# Altium footprint library header.PcbLib: 139 footprints (part 8 of 9)
Each footprint in its own frame and in the unit in brackets; x right, y up, seen from the top. Pads: shape width x height; smd on the part's side, far side on the other; paste and mask are expansions set on the pad; w line width, h text height; cw(c..) or ccw(c..) is an arc to the next point about the centre after c.
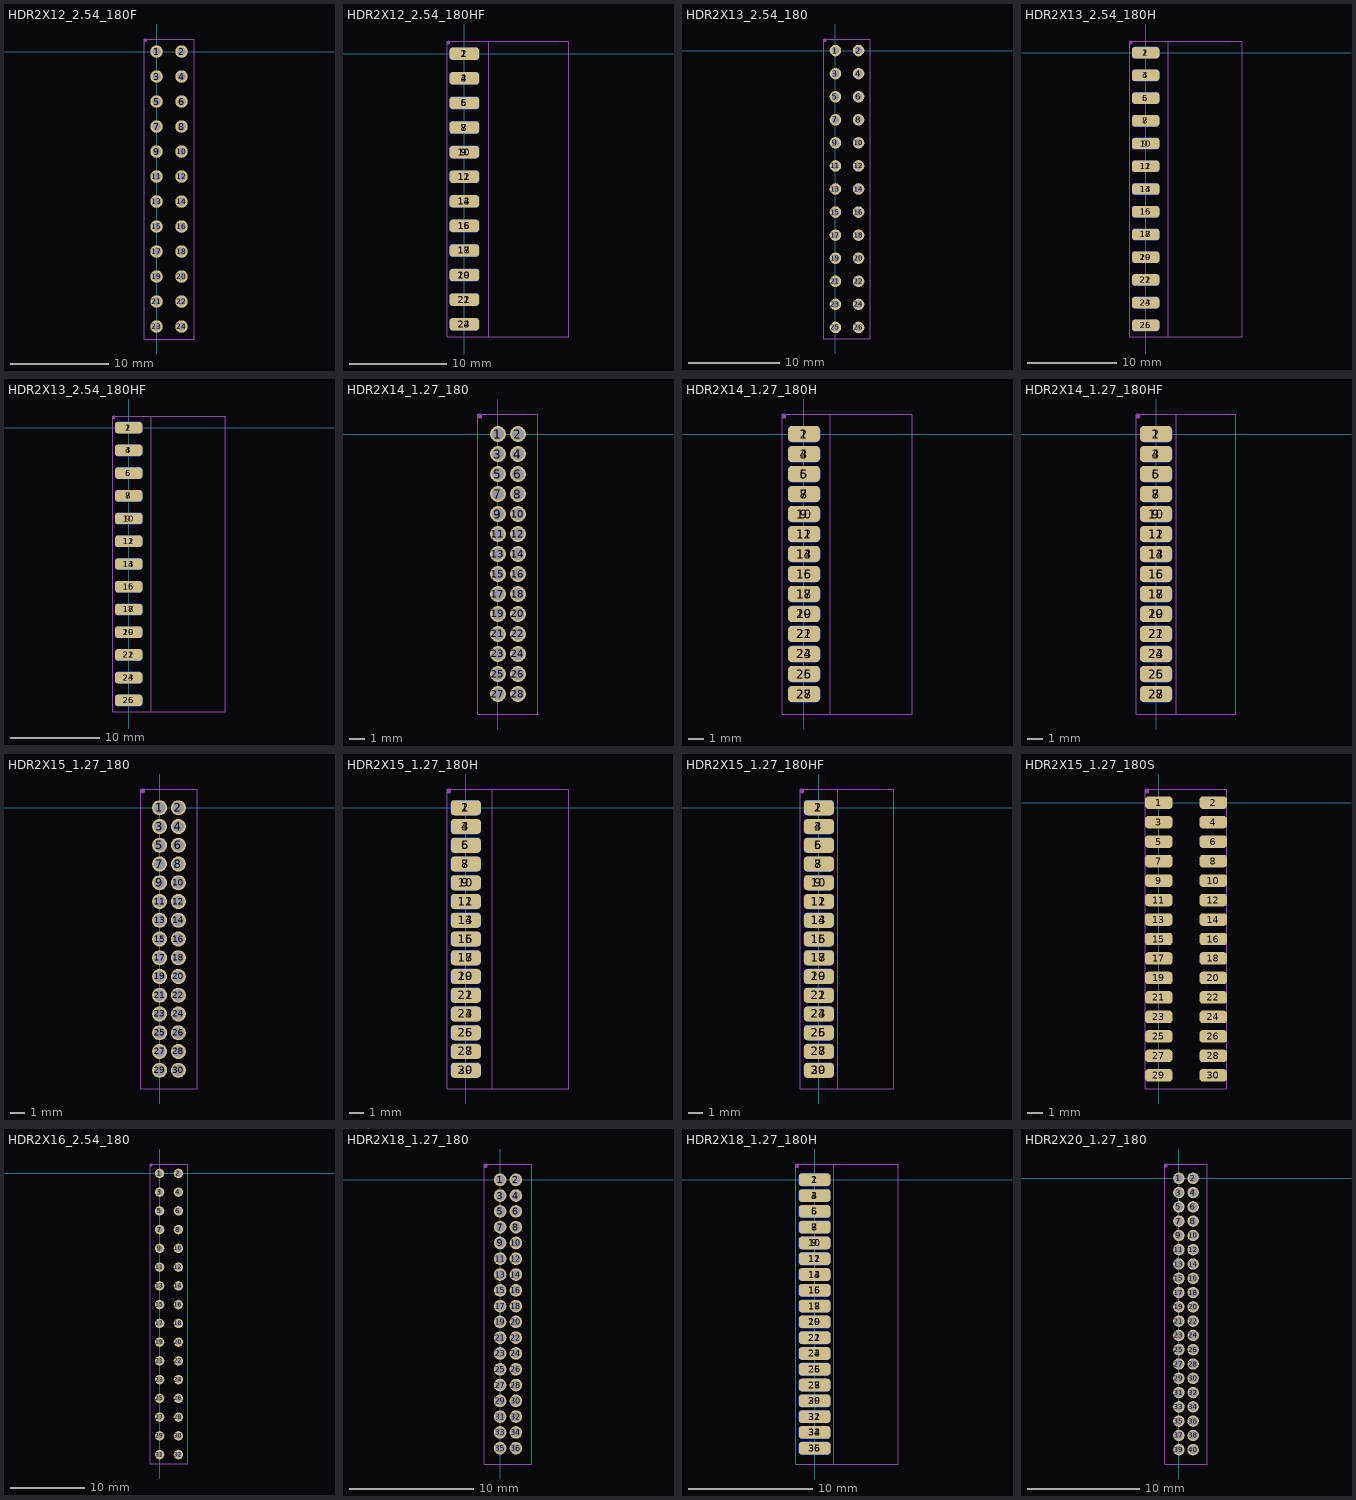
[diagram p7: the footprints below, top view; thin cyan lines are the x and y axes]

## HDR2X12_2.54_180F [mil]
height 169.29
pads (24):
  round 50 hole 32: 1(0,0) 2(100,0) 3(0,-100) 4(100,-100) 5(0,-200) 6(100,-200) 7(0,-300) 8(100,-300) 9(0,-400) 10(100,-400) 11(0,-500) 12(100,-500) 13(0,-600) 14(100,-600) 15(0,-700) 16(100,-700) 17(0,-800) 18(100,-800) 19(0,-900) 20(100,-900) 21(0,-1000) 22(100,-1000) 23(0,-1100) 24(100,-1100)
Mechanical 13:
  lines w2: -50,-1150 -50,50 150,50 150,-1150 -50,-1150
Top Component (Mech14):
  circle w2: c-45,45 r5
  region: -45,40 -45.99,40 -47.83,40.76 -49.24,42.17 -50,44.01 -50,45 -50,45.99 -49.24,47.83 -47.83,49.24 -45.99,50 -45,50 -44.01,50 -42.17,49.24 -40.76,47.83 -40,45.99 -40,45 -40,44.01 -40.76,42.17 -42.17,40.76 -44.01,40
  lines w2: -50,-1150 150,-1150 150,50 -50,50 -50,-1150
  text ".Designator" at 19,-570 h80
3D body "female_header_a-bl254-dg-g24d.stp": height 334.65, standoff -125.98, extent -48.43,-1154.92 148.42,54.92

## HDR2X12_2.54_180HF [mil]
height 169.29
pads (24):
  rrect50% 120x50 smd: 1(0,0) 3(0,-100) 5(0,-200) 7(0,-300) 9(0,-400) 11(0,-500) 13(0,-600) 15(0,-700) 17(0,-800) 19(0,-900) 21(0,-1000) 23(0,-1100)
  rrect50% 120x50 smd far side: 2(0,0) 4(0,-100) 6(0,-200) 8(0,-300) 10(0,-400) 12(0,-500) 14(0,-600) 16(0,-700) 18(0,-800) 20(0,-900) 22(0,-1000) 24(0,-1100)
Mechanical 13:
  lines w2: -70,-1150 425,-1150 425,50 -70,50 -70,-1150
Top Component (Mech14):
  circle w2: c-65,45 r5
  region: -65,40 -65.99,40 -67.83,40.76 -69.24,42.17 -70,44.01 -70,45 -70,45.99 -69.24,47.83 -67.83,49.24 -65.99,50 -65,50 -64.01,50 -62.17,49.24 -60.76,47.83 -60,45.99 -60,45 -60,44.01 -60.76,42.17 -62.17,40.76 -64.01,40
  lines w2: -70,-1150 100,-1150 100,50 -70,50 -70,-1150
  text ".Designator" at -31,-570 h80
Bottom Component (Mech15):
  lines w2: -70,-1150 -70,50 100,50 100,-1150 -70,-1150
3D body "female_header_a-bl254-dg-g24d.stp": height 76.43, standoff -120.43, extent -35.97,-1154.92 424.66,54.92

## HDR2X13_2.54_180 [mil]
height 169.29
pads (26):
  round 50 hole 32: 1(0,0) 2(100,0) 3(0,-100) 4(100,-100) 5(0,-200) 6(100,-200) 7(0,-300) 8(100,-300) 9(0,-400) 10(100,-400) 11(0,-500) 12(100,-500) 13(0,-600) 14(100,-600) 15(0,-700) 16(100,-700) 17(0,-800) 18(100,-800) 19(0,-900) 20(100,-900) 21(0,-1000) 22(100,-1000) 23(0,-1100) 24(100,-1100) 25(0,-1200) 26(100,-1200)
Mechanical 13:
  lines w2: -50,-1250 -50,50 150,50 150,-1250 -50,-1250
Top Component (Mech14):
  circle w2: c-45,45 r5
  region: -45,40 -45.99,40 -47.83,40.76 -49.24,42.17 -50,44.01 -50,45 -50,45.99 -49.24,47.83 -47.83,49.24 -45.99,50 -45,50 -44.01,50 -42.17,49.24 -40.76,47.83 -40,45.99 -40,45 -40,44.01 -40.76,42.17 -42.17,40.76 -44.01,40
  lines w2: -50,-1250 150,-1250 150,50 -50,50 -50,-1250
  text ".Designator" at 19,-570 h80
3D body "pin_header_aw140-eg-g02d.stp": height 322.83, standoff -118.11, extent -50,-1249.18 150,-1150.82
3D body "pin_header_awl254-dg-g24d.stp": height 334.65, standoff -118.11, extent -50,-1149.99 150,50.01

## HDR2X13_2.54_180H [mil]
height 169.29
pads (26):
  rrect50% 120x50 smd: 1(0,0) 3(0,-100) 5(0,-200) 7(0,-300) 9(0,-400) 11(0,-500) 13(0,-600) 15(0,-700) 17(0,-800) 19(0,-900) 21(0,-1000) 23(0,-1100) 25(0,-1200)
  rrect50% 120x50 smd far side: 2(0,0) 4(0,-100) 6(0,-200) 8(0,-300) 10(0,-400) 12(0,-500) 14(0,-600) 16(0,-700) 18(0,-800) 20(0,-900) 22(0,-1000) 24(0,-1100) 26(0,-1200)
Mechanical 13:
  lines w2: -70,-1250 425,-1250 425,50 -70,50 -70,-1250
Top Component (Mech14):
  circle w2: c-65,45 r5
  region: -65,40 -65.99,40 -67.83,40.76 -69.24,42.17 -70,44.01 -70,45 -70,45.99 -69.24,47.83 -67.83,49.24 -65.99,50 -65,50 -64.01,50 -62.17,49.24 -60.76,47.83 -60,45.99 -60,45 -60,44.01 -60.76,42.17 -62.17,40.76 -64.01,40
  lines w2: -70,-1250 100,-1250 100,50 -70,50 -70,-1250
  text ".Designator" at -31,-620 h80
Bottom Component (Mech15):
  lines w2: -70,-1250 100,-1250 100,50 -70,50 -70,-1250
3D body "pin_header_awl254-dg-g26d.stp": height 100, standoff -100, extent -36.38,-1250 416.38,50

## HDR2X13_2.54_180HF [mil]
height 169.29
pads (26):
  rrect50% 120x50 smd: 1(0,0) 3(0,-100) 5(0,-200) 7(0,-300) 9(0,-400) 11(0,-500) 13(0,-600) 15(0,-700) 17(0,-800) 19(0,-900) 21(0,-1000) 23(0,-1100) 25(0,-1200)
  rrect50% 120x50 smd far side: 2(0,0) 4(0,-100) 6(0,-200) 8(0,-300) 10(0,-400) 12(0,-500) 14(0,-600) 16(0,-700) 18(0,-800) 20(0,-900) 22(0,-1000) 24(0,-1100) 26(0,-1200)
Mechanical 13:
  lines w2: -70,-1250 425,-1250 425,50 -70,50 -70,-1250
Top Component (Mech14):
  circle w2: c-65,45 r5
  region: -65,40 -65.99,40 -67.83,40.76 -69.24,42.17 -70,44.01 -70,45 -70,45.99 -69.24,47.83 -67.83,49.24 -65.99,50 -65,50 -64.01,50 -62.17,49.24 -60.76,47.83 -60,45.99 -60,45 -60,44.01 -60.76,42.17 -62.17,40.76 -64.01,40
  lines w2: -70,-1250 100,-1250 100,50 -70,50 -70,-1250
  text ".Designator" at -31,-620 h80
Bottom Component (Mech15):
  lines w2: -70,-1250 100,-1250 100,50 -70,50 -70,-1250
3D body "female_header_a-bl254-dg-g26d.stp": height 76.43, standoff -120.43, extent -35.98,-1254.92 424.65,54.92

## HDR2X14_1.27_180 [mil]
height 169.29
pads (28):
  round 40 hole 30: 1(0,0) 2(50,0) 3(0,-50) 4(50,-50) 5(0,-100) 6(50,-100) 7(0,-150) 8(50,-150) 9(0,-200) 10(50,-200) 11(0,-250) 12(50,-250) 13(0,-300) 14(50,-300) 15(0,-350) 16(50,-350) 17(0,-400) 18(50,-400) 19(0,-450) 20(50,-450) 21(0,-500) 22(50,-500) 23(0,-550) 24(50,-550) 25(0,-600) 26(50,-600) 27(0,-650) 28(50,-650)
Mechanical 13:
  lines w2: -50,-700 100,-700 100,50 -50,50 -50,-700
Top Component (Mech14):
  circle w2: c-45,45 r5
  region: -45,40 -45.99,40 -47.83,40.76 -49.24,42.17 -50,44.01 -50,45 -50,45.99 -49.24,47.83 -47.83,49.24 -45.99,50 -45,50 -44.01,50 -42.17,49.24 -40.76,47.83 -40,45.99 -40,45 -40,44.01 -40.76,42.17 -42.17,40.76 -44.01,40
  lines w2: -50,-700 100,-700 100,50 -50,50 -50,-700
  text ".Designator" at -6,-345 h80
3D body "pin_header_a-sl127-dg-g28d.stp": height 210.24, standoff -102.36, extent -73.42,-674.99 123.43,25.01

## HDR2X14_1.27_180H [mil]
height 169.29
pads (28):
  rrect50% 80x40 smd: 1(0,0) 3(0,-50) 5(0,-100) 7(0,-150) 9(0,-200) 11(0,-250) 13(0,-300) 15(0,-350) 17(0,-400) 19(0,-450) 21(0,-500) 23(0,-550) 25(0,-600) 27(0,-650)
  rrect50% 80x40 smd far side: 2(0,0) 4(0,-50) 6(0,-100) 8(0,-150) 10(0,-200) 12(0,-250) 14(0,-300) 16(0,-350) 18(0,-400) 20(0,-450) 22(0,-500) 24(0,-550) 26(0,-600) 28(0,-650)
Mechanical 13:
  lines w2: -55,-700 270,-700 270,50 -55,50 -55,-700
Top Component (Mech14):
  circle w2: c-50,45 r5
  region: -50,40 -50.99,40 -52.83,40.76 -54.24,42.17 -55,44.01 -55,45 -55,45.99 -54.24,47.83 -52.83,49.24 -50.99,50 -50,50 -49.01,50 -47.17,49.24 -45.76,47.83 -45,45.99 -45,45 -45,44.01 -45.76,42.17 -47.17,40.76 -49.01,40
  lines w2: -55,-700 65,-700 65,50 -55,50 -55,-700
  text ".Designator" at -31,-345 h80
3D body "pin_header_a-sl127-dg-g28d.stp": height 76.43, standoff -120.43, extent -41.22,-675 271.38,25

## HDR2X14_1.27_180HF [mil]
height 169.29
pads (28):
  rrect50% 80x40 smd: 1(0,0) 3(0,-50) 5(0,-100) 7(0,-150) 9(0,-200) 11(0,-250) 13(0,-300) 15(0,-350) 17(0,-400) 19(0,-450) 21(0,-500) 23(0,-550) 25(0,-600) 27(0,-650)
  rrect50% 80x40 smd far side: 2(0,0) 4(0,-50) 6(0,-100) 8(0,-150) 10(0,-200) 12(0,-250) 14(0,-300) 16(0,-350) 18(0,-400) 20(0,-450) 22(0,-500) 24(0,-550) 26(0,-600) 28(0,-650)
Mechanical 13:
  lines w2: -50,-700 -50,50 200,50 200,-700 -50,-700
Top Component (Mech14):
  circle w2: c-45,45 r5
  region: -45,40 -45.99,40 -47.83,40.76 -49.24,42.17 -50,44.01 -50,45 -50,45.99 -49.24,47.83 -47.83,49.24 -45.99,50 -45,50 -44.01,50 -42.17,49.24 -40.76,47.83 -40,45.99 -40,45 -40,44.01 -40.76,42.17 -42.17,40.76 -44.01,40
  lines w2: -50,-700 -50,50 50,50 50,-700 -50,-700
  text ".Designator" at -31,-345 h80
3D body "female_header_a-bl127-dg-g28d.stp": height 40.02, standoff -82.02, extent -28.34,-682.88 200.01,32.87

## HDR2X15_1.27_180 [mil]
height 169.29
pads (30):
  round 40 hole 30: 1(0,0) 2(50,0) 3(0,-50) 4(50,-50) 5(0,-100) 6(50,-100) 7(0,-150) 8(50,-150) 9(0,-200) 10(50,-200) 11(0,-250) 12(50,-250) 13(0,-300) 14(50,-300) 15(0,-350) 16(50,-350) 17(0,-400) 18(50,-400) 19(0,-450) 20(50,-450) 21(0,-500) 22(50,-500) 23(0,-550) 24(50,-550) 25(0,-600) 26(50,-600) 27(0,-650) 28(50,-650) 29(0,-700) 30(50,-700)
Mechanical 13:
  lines w2: -50,-750 -50,50 100,50 100,-750 -50,-750
Top Component (Mech14):
  circle w2: c-45,45 r5
  region: -45,40 -45.99,40 -47.83,40.76 -49.24,42.17 -50,44.01 -50,45 -50,45.99 -49.24,47.83 -47.83,49.24 -45.99,50 -45,50 -44.01,50 -42.17,49.24 -40.76,47.83 -40,45.99 -40,45 -40,44.01 -40.76,42.17 -42.17,40.76 -44.01,40
  lines w2: -50,-750 -50,50 100,50 100,-750 -50,-750
  text ".Designator" at -6,-395 h80
3D body "pin_header_a-sl127-dg-g30d.stp": height 210.24, standoff -102.36, extent -73.43,-724.99 123.42,25

## HDR2X15_1.27_180H [mil]
height 169.29
pads (30):
  rrect50% 80x40 smd: 1(0,0) 3(0,-50) 5(0,-100) 7(0,-150) 9(0,-200) 11(0,-250) 13(0,-300) 15(0,-350) 17(0,-400) 19(0,-450) 21(0,-500) 23(0,-550) 25(0,-600) 27(0,-650) 29(0,-700)
  rrect50% 80x40 smd far side: 2(0,0) 4(0,-50) 6(0,-100) 8(0,-150) 10(0,-200) 12(0,-250) 14(0,-300) 16(0,-350) 18(0,-400) 20(0,-450) 22(0,-500) 24(0,-550) 26(0,-600) 28(0,-650) 30(0,-700)
Mechanical 13:
  lines w2: -50,-750 -50,50 275,50 275,-750 -50,-750
Top Component (Mech14):
  circle w2: c-45,45 r5
  region: -45,40 -45.99,40 -47.83,40.76 -49.24,42.17 -50,44.01 -50,45 -50,45.99 -49.24,47.83 -47.83,49.24 -45.99,50 -45,50 -44.01,50 -42.17,49.24 -40.76,47.83 -40,45.99 -40,45 -40,44.01 -40.76,42.17 -42.17,40.76 -44.01,40
  lines w2: -50,-750 -50,50 70,50 70,-750 -50,-750
  text ".Designator" at -26,-370 h80
3D body "pin_header_a-sl127-dg-g30d.stp": height 76.43, standoff -120.43, extent -36.22,-724.99 276.38,25

## HDR2X15_1.27_180HF [mil]
height 169.29
pads (30):
  rrect50% 80x40 smd: 1(0,0) 3(0,-50) 5(0,-100) 7(0,-150) 9(0,-200) 11(0,-250) 13(0,-300) 15(0,-350) 17(0,-400) 19(0,-450) 21(0,-500) 23(0,-550) 25(0,-600) 27(0,-650) 29(0,-700)
  rrect50% 80x40 smd far side: 2(0,0) 4(0,-50) 6(0,-100) 8(0,-150) 10(0,-200) 12(0,-250) 14(0,-300) 16(0,-350) 18(0,-400) 20(0,-450) 22(0,-500) 24(0,-550) 26(0,-600) 28(0,-650) 30(0,-700)
Mechanical 13:
  lines w2: -50,-750 -50,50 200,50 200,-750 -50,-750
Top Component (Mech14):
  circle w2: c-45,45 r5
  region: -45,40 -45.99,40 -47.83,40.76 -49.24,42.17 -50,44.01 -50,45 -50,45.99 -49.24,47.83 -47.83,49.24 -45.99,50 -45,50 -44.01,50 -42.17,49.24 -40.76,47.83 -40,45.99 -40,45 -40,44.01 -40.76,42.17 -42.17,40.76 -44.01,40
  lines w2: -50,-750 -50,50 50,50 50,-750 -50,-750
  text ".Designator" at -31,-370 h80
3D body "female_header_a-bl127-dg-g30d.stp": height 40.02, standoff -82.02, extent -28.34,-732.88 200.01,32.87

## HDR2X15_1.27_180S [mil]
height 169.29
pads (30):
  rrect50% 70x32 smd: 1(0,0) 2(140,0) 3(0,-50) 4(140,-50) 5(0,-100) 6(140,-100) 7(0,-150) 8(140,-150) 9(0,-200) 10(140,-200) 11(0,-250) 12(140,-250) 13(0,-300) 14(140,-300) 15(0,-350) 16(140,-350) 17(0,-400) 18(140,-400) 19(0,-450) 20(140,-450) 21(0,-500) 22(140,-500) 23(0,-550) 24(140,-550) 25(0,-600) 26(140,-600) 27(0,-650) 28(140,-650) 29(0,-700) 30(140,-700)
Mechanical 13:
  lines w2: -35,-735 175,-735 175,35 -35,35 -35,-735
Top Component (Mech14):
  circle w2: c-30,30 r5
  region: -30,25 -30.99,25 -32.83,25.76 -34.24,27.17 -35,29.01 -35,30 -35,30.99 -34.24,32.83 -32.83,34.24 -30.99,35 -30,35 -29.01,35 -27.17,34.24 -25.76,32.83 -25,30.99 -25,30 -25,29.01 -25.76,27.17 -27.17,25.76 -29.01,25
  lines w2: -35,-735 175,-735 175,35 -35,35 -35,-735
  text ".Designator" at 44,-370 h80
3D body "pin_header_a-sl127-dg-g30mp1.stp": height 252.13, standoff 0.25, extent -38.31,-725 178.31,25

## HDR2X16_2.54_180 [mil]
height 169.29
pads (32):
  round 50 hole 32: 1(0,0) 2(100,0) 3(0,-100) 4(100,-100) 5(0,-200) 6(100,-200) 7(0,-300) 8(100,-300) 9(0,-400) 10(100,-400) 11(0,-500) 12(100,-500) 13(0,-600) 14(100,-600) 15(0,-700) 16(100,-700) 17(0,-800) 18(100,-800) 19(0,-900) 20(100,-900) 21(0,-1000) 22(100,-1000) 23(0,-1100) 24(100,-1100) 25(0,-1200) 26(100,-1200) 27(0,-1300) 28(100,-1300) 29(0,-1400) 30(100,-1400) 31(0,-1500) 32(100,-1500)
Mechanical 13:
  lines w2: -50,-1550 150,-1550 150,50 -50,50 -50,-1550
Top Component (Mech14):
  circle w2: c-45,45 r5
  region: -45,40 -45.99,40 -47.83,40.76 -49.24,42.17 -50,44.01 -50,45 -50,45.99 -49.24,47.83 -47.83,49.24 -45.99,50 -45,50 -44.01,50 -42.17,49.24 -40.76,47.83 -40,45.99 -40,45 -40,44.01 -40.76,42.17 -42.17,40.76 -44.01,40
  lines w2: -50,-1550 150,-1550 150,50 -50,50 -50,-1550
  text ".Designator" at 19,-770 h80
3D body "pin_header_awl254-dg-g32d.stp": height 334.65, standoff -118.11, extent -50,-1550 150,50

## HDR2X18_1.27_180 [mil]
height 169.29
pads (36):
  round 40 hole 30: 1(0,0) 2(50,0) 3(0,-50) 4(50,-50) 5(0,-100) 6(50,-100) 7(0,-150) 8(50,-150) 9(0,-200) 10(50,-200) 11(0,-250) 12(50,-250) 13(0,-300) 14(50,-300) 15(0,-350) 16(50,-350) 17(0,-400) 18(50,-400) 19(0,-450) 20(50,-450) 21(0,-500) 22(50,-500) 23(0,-550) 24(50,-550) 25(0,-600) 26(50,-600) 27(0,-650) 28(50,-650) 29(0,-700) 30(50,-700) 31(0,-750) 32(50,-750) 33(0,-800) 34(50,-800) 35(0,-850) 36(49.99,-850)
Mechanical 13:
  lines w2: -50,-900 100,-900 100,50 -50,50 -50,-900
Top Component (Mech14):
  circle w2: c-45,45 r5
  region: -45,40 -45.99,40 -47.83,40.76 -49.24,42.17 -50,44.01 -50,45 -50,45.99 -49.24,47.83 -47.83,49.24 -45.99,50 -45,50 -44.01,50 -42.17,49.24 -40.76,47.83 -40,45.99 -40,45 -40,44.01 -40.76,42.17 -42.17,40.76 -44.01,40
  lines w2: -50,-900 100,-900 100,50 -50,50 -50,-900
  text ".Designator" at -6,-445 h80
3D body "pin_header_a-sl127-dg-g36d.stp": height 210.24, standoff -102.36, extent -73.43,-874.99 123.43,25.01

## HDR2X18_1.27_180H [mil]
height 169.29
pads (36):
  rrect50% 100x40 smd: 1(0,0) 3(0,-50) 5(0,-100) 7(0,-150) 9(0,-200) 11(0,-250) 13(0,-300) 15(0,-350) 17(0,-400) 19(0,-450) 21(0,-500) 23(0,-550) 25(0,-600) 27(0,-650) 29(0,-700) 31(0,-750) 33(0,-800) 35(0,-850)
  rrect50% 100x40 smd far side: 2(0,0) 4(0,-50) 6(0,-100) 8(0,-150) 10(0,-200) 12(0,-250) 14(0,-300) 16(0,-350) 18(0,-400) 20(0,-450) 22(0,-500) 24(0,-550) 26(0,-600) 28(0,-650) 30(0,-700) 32(0,-750) 34(0,-800) 36(0,-850)
Mechanical 13:
  lines w2: -60,-900 265,-900 265,50 -60,50 -60,-900
Top Component (Mech14):
  circle w2: c-55,45 r5
  region: -55,40 -55.99,40 -57.83,40.76 -59.24,42.17 -60,44.01 -60,45 -60,45.99 -59.24,47.83 -57.83,49.24 -55.99,50 -55,50 -54.01,50 -52.17,49.24 -50.76,47.83 -50,45.99 -50,45 -50,44.01 -50.76,42.17 -52.17,40.76 -54.01,40
  lines w2: -60,-900 60,-900 60,50 -60,50 -60,-900
  text ".Designator" at -31,-445 h80
3D body "pin_header_a-sl127-dg-g36d.stp": height 76.43, standoff -120.43, extent -47.36,-874.99 265.24,25.01

## HDR2X20_1.27_180 [mil]
height 169.29
pads (40):
  round 40 hole 30: 1(0,0) 2(50,0) 3(0,-50) 4(50,-50) 5(0,-100) 6(50,-100) 7(0,-150) 8(50,-150) 9(0,-200) 10(50,-200) 11(0,-250) 12(50,-250) 13(0,-300) 14(50,-300) 15(0,-350) 16(50,-350) 17(0,-400) 18(50,-400) 19(0,-450) 20(50,-450) 21(0,-500) 22(50,-500) 23(0,-550) 24(50,-550) 25(0,-600) 26(50,-600) 27(0,-650) 28(50,-650) 29(0,-700) 30(50,-700) 31(0,-750) 32(50,-750) 33(0,-800) 34(50,-800) 35(0,-850) 36(49.99,-850) 37(-0.01,-900) 38(49.99,-900) 39(-0.01,-950) 40(49.99,-950)
Mechanical 13:
  lines w2: -50,-1000 100,-1000 100,50 -50,50 -50,-1000
Top Component (Mech14):
  circle w2: c-45,45 r5
  region: -45,40 -45.99,40 -47.83,40.76 -49.24,42.17 -50,44.01 -50,45 -50,45.99 -49.24,47.83 -47.83,49.24 -45.99,50 -45,50 -44.01,50 -42.17,49.24 -40.76,47.83 -40,45.99 -40,45 -40,44.01 -40.76,42.17 -42.17,40.76 -44.01,40
  lines w2: -50,-1000 100,-1000 100,50 -50,50 -50,-1000
  text ".Designator" at -6,-495 h80